# Altium footprint library HOLYIOT-25007-module.PcbLib: 1 footprints
Each footprint in its own frame and in the unit in brackets; x right, y up, seen from the top. Pads: shape width x height; smd on the part's side, far side on the other; paste and mask are expansions set on the pad; w line width, h text height; cw(c..) or ccw(c..) is an arc to the next point about the centre after c.
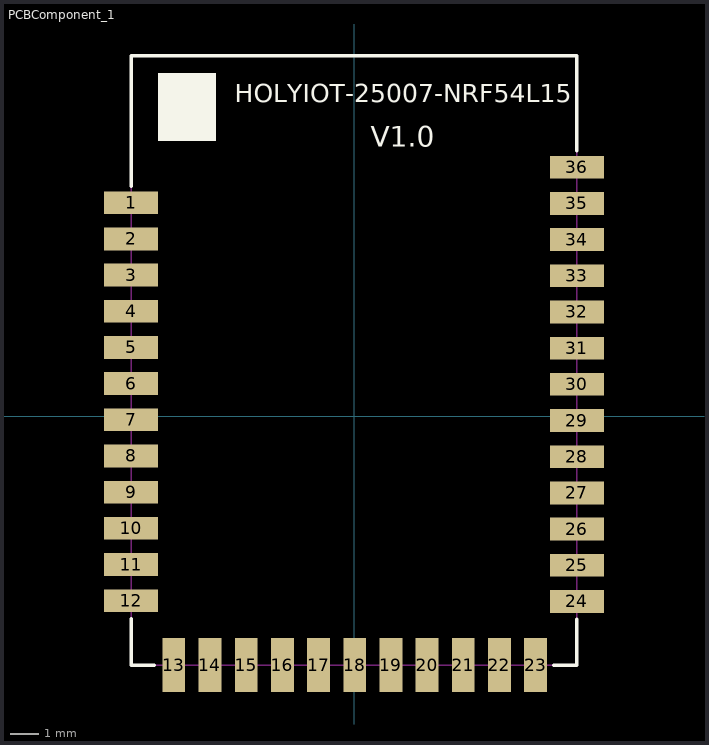
[diagram p0: the footprint, top view; thin cyan lines are the x and y axes]

## PCBComponent_1 [mm]
pads (36):
  rect 1.9x0.8 smd: 1(-7.823,7.493) 2(-7.823,6.223) 3(-7.823,4.953) 4(-7.823,3.683) 5(-7.823,2.413) 6(-7.823,1.143) 7(-7.823,-0.127) 8(-7.823,-1.397) 9(-7.823,-2.667) 10(-7.823,-3.937) 11(-7.823,-5.207) 12(-7.823,-6.477) 24(7.823,-6.502) 25(7.823,-5.232) 26(7.823,-3.962) 27(7.823,-2.692) 28(7.823,-1.422) 29(7.823,-0.152) 30(7.823,1.118) 31(7.823,2.388) 32(7.823,3.658) 33(7.823,4.928) 34(7.823,6.198) 35(7.823,7.468) 36(7.823,8.738)
  rect 0.8x1.9 smd: 13(-6.325,-8.738) 14(-5.055,-8.738) 15(-3.785,-8.738) 16(-2.515,-8.738) 17(-1.245,-8.738) 18(0.025,-8.738) 19(1.295,-8.738) 20(2.565,-8.738) 21(3.835,-8.738) 22(5.105,-8.738) 23(6.375,-8.738)
Top Overlay:
  rectangle: -6.875,9.652 -4.843,12.04
  lines w0.127: -7.823,-7.112 -7.823,-8.738 -7.01,-8.738 ; -7.823,8.077 -7.823,12.649 7.823,12.649 7.823,9.322 ; 7.01,-8.738 7.823,-8.738 7.823,-7.137
  text "V1.0" at 0.584,9.449 h0.71
  text "HOLYIOT-25007-NRF54L15" at -4.191,11.024 h0.64
Keep-Out Layer:
  lines w0.05: -7.823,-8.738 7.823,-8.738 7.823,12.649 -7.823,12.649 -7.823,-8.738